# Altium schematic symbol library CHOKE,CM,2LN,800nH,300mA.SchLib: 1 symbol
Pins are listed as number, name and electrical type; pins without a type are passive.

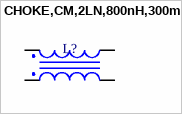
[diagram p0: symbol CHOKE,CM,2LN,800nH,300mA]

## CHOKE,CM,2LN,800nH,300mA
designator L?
pins: 1, 2, 3, 4